# Altium footprint library LCSC3D.PcbLib: 2 footprints
Each footprint in its own frame and in the unit in brackets; x right, y up, seen from the top. Pads: shape width x height; smd on the part's side, far side on the other; paste and mask are expansions set on the pad; w line width, h text height; cw(c..) or ccw(c..) is an arc to the next point about the centre after c.
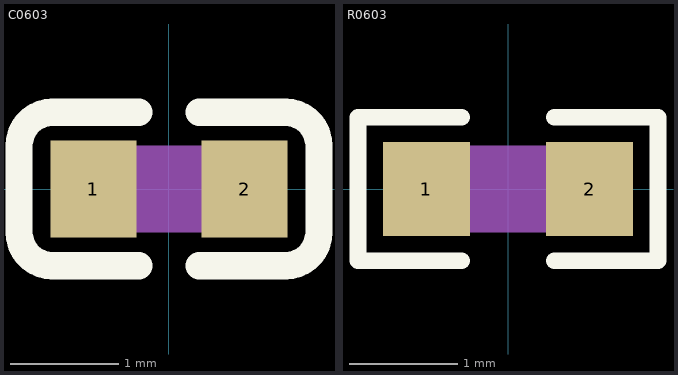
[diagram p0: the footprints below, top view; thin cyan lines are the x and y axes]

## C0603 [mm] "100nF (104) ±10% 50V"
pads (2):
  rect 0.8x0.9 smd paste+0 mask+0.051: 1(-0.7,0) 2(0.7,0)
TOPOVERLAY:
  lines w0.254: -1.08,-0.71 -0.28,-0.71 ; -1.08,0.71 -0.28,0.71 ; -1.08,-0.71 -1.134,-0.705 -1.186,-0.691 -1.235,-0.668 -1.279,-0.637 -1.317,-0.599 -1.348,-0.555 -1.371,-0.506 -1.385,-0.454 -1.39,-0.4 -1.39,0.4 -1.385,0.454 -1.371,0.506 -1.348,0.555 -1.317,0.599 -1.279,0.638 -1.235,0.669 -1.186,0.691 -1.134,0.705 -1.08,0.71 ; 0.28,-0.71 1.08,-0.71 1.134,-0.705 1.186,-0.691 1.235,-0.669 1.279,-0.638 1.318,-0.599 1.349,-0.555 1.371,-0.506 1.385,-0.454 1.39,-0.4 1.39,0.4 1.385,0.454 1.371,0.506 1.349,0.555 1.318,0.599 1.279,0.637 1.235,0.668 1.186,0.691 1.134,0.705 1.08,0.71 0.28,0.71
MECHANICAL9:
  region: -0.8,-0.4 -0.8,0.4 0.8,0.4 0.8,-0.4
MECHANICAL11:
  region: -0.77,-0.4 -0.774,-0.415 -0.785,-0.426 -0.8,-0.43 -0.815,-0.426 -0.826,-0.415 -0.83,-0.4 -0.826,-0.385 -0.815,-0.374 -0.8,-0.37 -0.785,-0.374 -0.774,-0.385
MECHANICAL12:
  region: -0.8,-0.4 -0.8,0.4 -0.5,0.4 -0.5,-0.4
  region: 0.8,-0.4 0.8,0.4 0.5,0.4 0.5,-0.4
3D body "f9918dd3888f5ca8b9c906b8cb10b9d8e335f6855513b3e235a18123ae353a78.step": height 0, standoff 0, extent -1.1,-0.45 1.1,0.45

## R0603 [mm] "10KΩ (1002) ±1%"
pads (2):
  rect 0.806x0.864 smd paste-100 mask+0.051: 1(-0.753,0) 2(0.753,0)
TOPOVERLAY:
  lines w0.152: -0.426,-0.661 -1.385,-0.661 -1.385,0.661 -0.426,0.661 ; 0.426,-0.661 1.385,-0.661 1.385,0.661 0.426,0.661
TOPPASTE:
  region: 1.195,0.45 0.395,0.45 0.345,0.4 0.345,0.172 0.715,0.172 0.715,-0.158 0.345,-0.158 0.345,-0.4 0.395,-0.45 1.195,-0.45 1.245,-0.4 1.245,0.4
  region: -1.195,-0.45 -0.395,-0.45 -0.345,-0.4 -0.345,-0.172 -0.715,-0.172 -0.715,0.158 -0.345,0.158 -0.345,0.4 -0.395,0.45 -1.195,0.45 -1.245,0.4 -1.245,-0.4
MECHANICAL9:
  region: -0.8,-0.4 -0.8,0.4 0.8,0.4 0.8,-0.4
MECHANICAL11:
  region: -0.77,-0.4 -0.774,-0.415 -0.785,-0.426 -0.8,-0.43 -0.815,-0.426 -0.826,-0.415 -0.83,-0.4 -0.826,-0.385 -0.815,-0.374 -0.8,-0.37 -0.785,-0.374 -0.774,-0.385
MECHANICAL12:
  region: -0.8,-0.4 -0.8,0.4 -0.5,0.4 -0.5,-0.4
  region: 0.8,-0.4 0.8,0.4 0.5,0.4 0.5,-0.4
3D body "e52f17888a8c6c2cb8d56dccf25e2ed131a12a241311657622543c405e42826c.step": height 0, standoff 0, extent -1.156,-0.432 1.156,0.432